# Altium footprint library Resistores_PTH_RES-50.PcbLib: 17 footprints (part 1 of 2)
Each footprint in its own frame and in the unit in brackets; x right, y up, seen from the top. Pads: shape width x height; smd on the part's side, far side on the other; paste and mask are expansions set on the pad; w line width, h text height; cw(c..) or ccw(c..) is an arc to the next point about the centre after c.
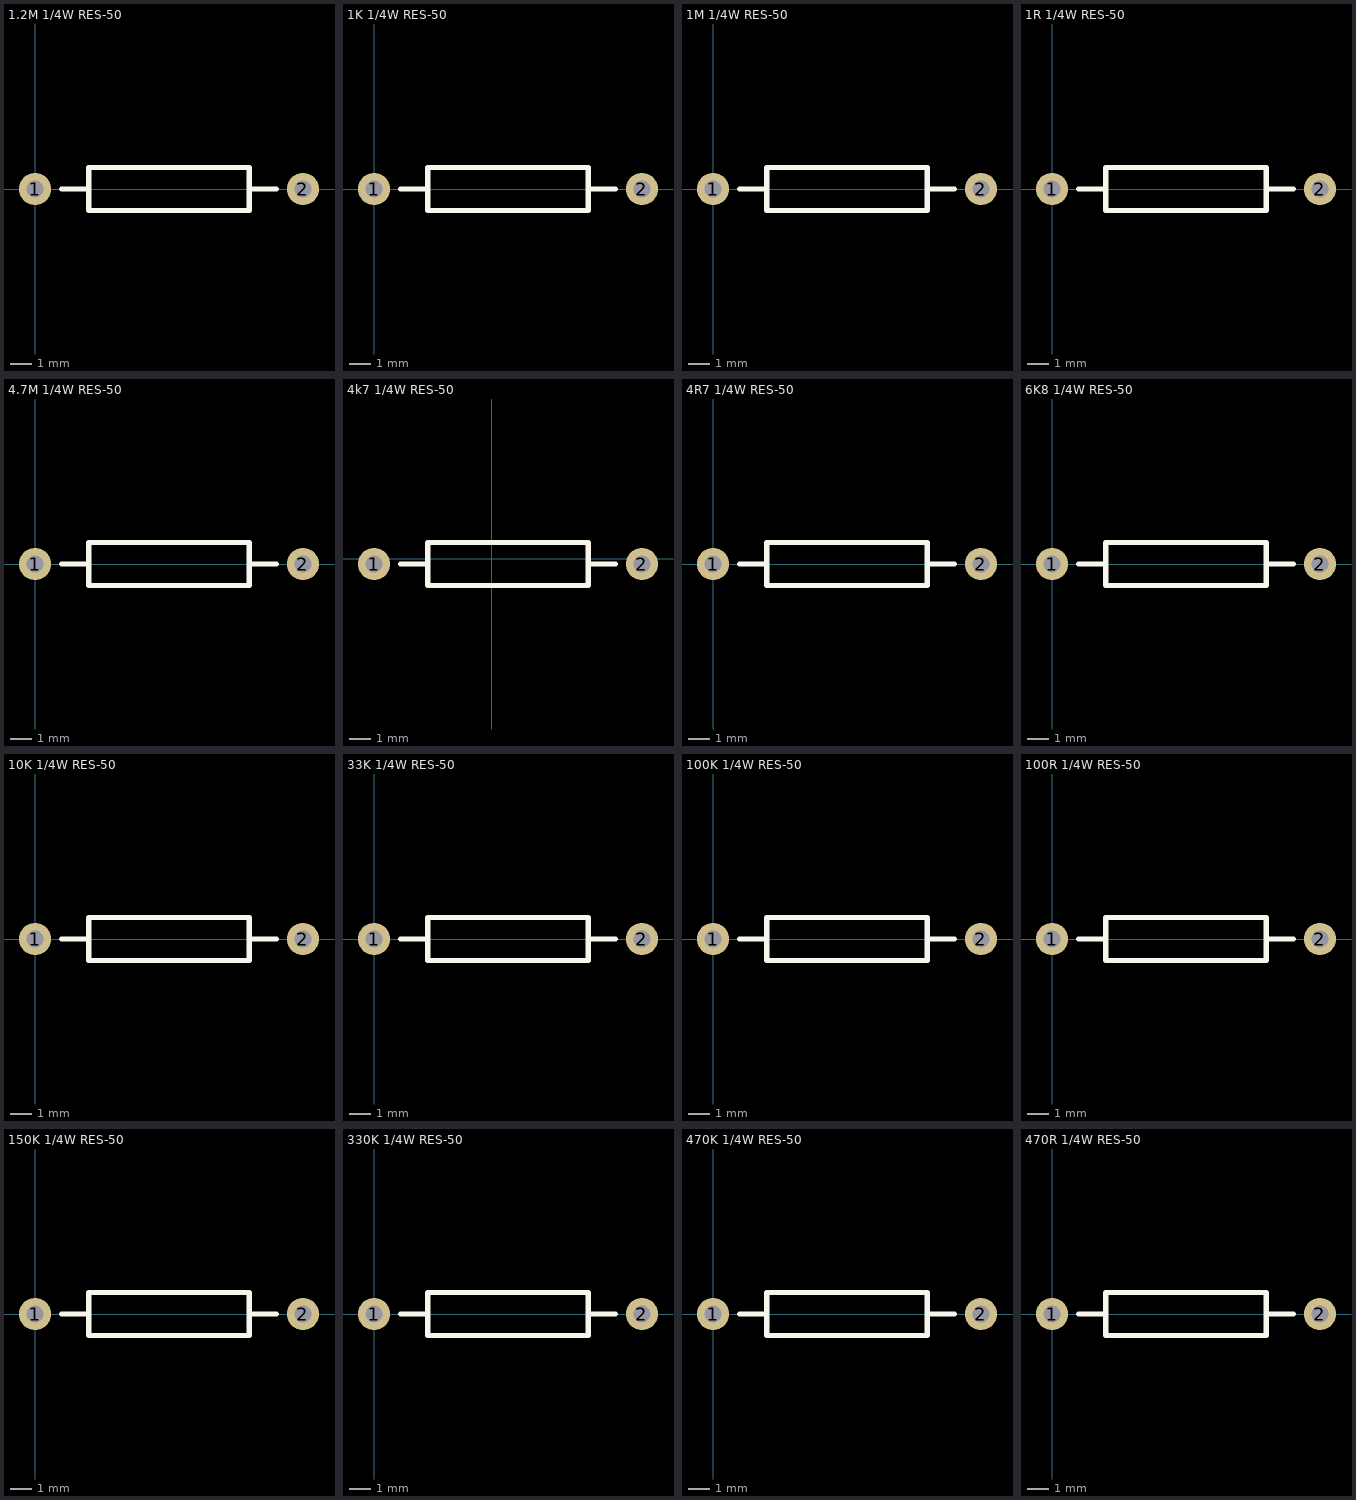
[diagram p0: the footprints below, top view; thin cyan lines are the x and y axes]

## 1.2M 1/4W RES-50 [mil]
pads (2):
  round 60 hole 31.5 unplated: 1(0,0) 2(500,0)
Top Overlay:
  lines w10: 50,0 100,0 ; 450,0 400,0 ; 100,0 100,-40 400,-40 400,0 ; 100,0 100,30 100,40 400,40 400,0
3D body "1M2.STEP": height 172.24, standoff -196.85, extent -14.77,-73.81 514.76,73.82

## 1K 1/4W RES-50 [mil]
pads (2):
  round 60 hole 31.5 unplated: 1(0,0) 2(500,0)
Top Overlay:
  lines w10: 50,0 100,0 ; 450,0 400,0 ; 100,0 100,30 100,40 400,40 400,0 ; 100,0 100,-40 400,-40 400,0
3D body "1k.STEP": height 172.24, standoff -196.85, extent -14.77,-73.81 514.76,73.82

## 1M 1/4W RES-50 [mil]
pads (2):
  round 60 hole 31.5 unplated: 1(0,0) 2(500,0)
Top Overlay:
  lines w10: 50,0 100,0 ; 450,0 400,0 ; 100,0 100,30 100,40 400,40 400,0 ; 100,0 100,-40 400,-40 400,0
3D body "1M.step": height 172.24, standoff -196.85, extent -14.77,-73.81 514.76,73.82

## 1R 1/4W RES-50 [mil]
pads (2):
  round 60 hole 31.5 unplated: 1(0,0) 2(500,0)
Top Overlay:
  lines w10: 50,0 100,0 ; 450,0 400,0 ; 100,0 100,30 100,40 400,40 400,0 ; 100,0 100,-40 400,-40 400,0
3D body "1R.STEP": height 172.24, standoff -196.85, extent -14.77,-73.81 514.76,73.82

## 4.7M 1/4W RES-50 [mil]
pads (2):
  round 60 hole 31.5 unplated: 1(0,0) 2(500,0)
Top Overlay:
  lines w10: 50,0 100,0 ; 450,0 400,0 ; 100,0 100,30 100,40 400,40 400,0 ; 100,0 100,-40 400,-40 400,0
3D body "4M7.STEP": height 172.24, standoff -196.85, extent -14.77,-73.81 514.76,73.82

## 4k7 1/4W RES-50 [mil]
pads (2):
  round 60 hole 31.5 unplated: 1(-220,-10) 2(280,-10)
Top Overlay:
  lines w10: -170,-10 -120,-10 ; 230,-10 180,-10 ; -120,-10 -120,-50 180,-50 180,-10 ; -120,-10 -120,20 -120,30 180,30 180,-10
3D body "4k7.STEP": height 172.24, standoff -196.85, extent -234.77,-83.81 294.76,63.82

## 4R7 1/4W RES-50 [mil]
pads (2):
  round 60 hole 31.5 unplated: 1(0,0) 2(500,0)
Top Overlay:
  lines w10: 50,0 100,0 ; 450,0 400,0 ; 100,0 100,-40 400,-40 400,0 ; 100,0 100,30 100,40 400,40 400,0
3D body "4R7.STEP": height 172.24, standoff -196.85, extent -14.77,-73.81 514.76,73.82

## 6K8 1/4W RES-50 [mil]
pads (2):
  round 60 hole 31.5 unplated: 1(0,0) 2(500,0)
Top Overlay:
  lines w10: 50,0 100,0 ; 450,0 400,0 ; 100,0 100,-40 400,-40 400,0 ; 100,0 100,30 100,40 400,40 400,0
3D body "6k8.STEP": height 172.24, standoff -196.85, extent -14.77,-73.81 514.76,73.82

## 10K 1/4W RES-50 [mil]
pads (2):
  round 60 hole 31.5 unplated: 1(0,0) 2(500,0)
Top Overlay:
  lines w10: 50,0 100,0 ; 450,0 400,0 ; 100,0 100,30 100,40 400,40 400,0 ; 100,0 100,-40 400,-40 400,0
3D body "10k.STEP": height 172.24, standoff -196.85, extent -14.77,-73.81 514.76,73.82

## 33K 1/4W RES-50 [mil]
pads (2):
  round 60 hole 31.5 unplated: 1(0,0) 2(500,0)
Top Overlay:
  lines w10: 50,0 100,0 ; 450,0 400,0 ; 100,0 100,-40 400,-40 400,0 ; 100,0 100,30 100,40 400,40 400,0
3D body "33K.STEP": height 172.24, standoff -196.85, extent -14.77,-73.81 514.76,73.82

## 100K 1/4W RES-50 [mil]
pads (2):
  round 60 hole 31.5 unplated: 1(0,0) 2(500,0)
Top Overlay:
  lines w10: 50,0 100,0 ; 450,0 400,0 ; 100,0 100,-40 400,-40 400,0 ; 100,0 100,30 100,40 400,40 400,0
3D body "100k.step": height 172.24, standoff -196.85, extent -14.77,-73.81 514.76,73.82

## 100R 1/4W RES-50 [mil]
pads (2):
  round 60 hole 31.5 unplated: 1(0,0) 2(500,0)
Top Overlay:
  lines w10: 50,0 100,0 ; 450,0 400,0 ; 100,0 100,30 100,40 400,40 400,0 ; 100,0 100,-40 400,-40 400,0
3D body "100R.step": height 172.24, standoff -196.85, extent -14.77,-73.81 514.76,73.82

## 150K 1/4W RES-50 [mil]
pads (2):
  round 60 hole 31.5: 1(0,0) 2(500,0)
Top Overlay:
  lines w10: 50,0 100,0 ; 450,0 400,0 ; 100,0 100,-40 400,-40 400,0 ; 100,0 100,30 100,40 400,40 400,0
3D body "150K.STEP": height 172.24, standoff -196.85, extent -14.77,-73.81 514.76,73.82

## 330K 1/4W RES-50 [mil]
pads (2):
  round 60 hole 31.5 unplated: 1(0,0) 2(500,0)
Top Overlay:
  lines w10: 50,0 100,0 ; 450,0 400,0 ; 100,0 100,30 100,40 400,40 400,0 ; 100,0 100,-40 400,-40 400,0
3D body "330K.STEP": height 172.24, standoff -196.85, extent -14.77,-73.81 514.76,73.82

## 470K 1/4W RES-50 [mil]
pads (2):
  round 60 hole 31.5 unplated: 1(0,0) 2(500,0)
Top Overlay:
  lines w10: 50,0 100,0 ; 450,0 400,0 ; 100,0 100,-40 400,-40 400,0 ; 100,0 100,30 100,40 400,40 400,0
3D body "470K.STEP": height 172.24, standoff -196.85, extent -14.77,-73.81 514.76,73.82

## 470R 1/4W RES-50 [mil]
pads (2):
  round 60 hole 31.5 unplated: 1(0,0) 2(500,0)
Top Overlay:
  lines w10: 50,0 100,0 ; 450,0 400,0 ; 100,0 100,30 100,40 400,40 400,0 ; 100,0 100,-40 400,-40 400,0
3D body "470.STEP": height 172.24, standoff -196.85, extent -14.77,-73.81 514.76,73.82